# Altium footprint library 7343 footprint - pol cap.PcbLib: 1 footprints
Each footprint in its own frame and in the unit in brackets; x right, y up, seen from the top. Pads: shape width x height; smd on the part's side, far side on the other; paste and mask are expansions set on the pad; w line width, h text height; cw(c..) or ccw(c..) is an arc to the next point about the centre after c.
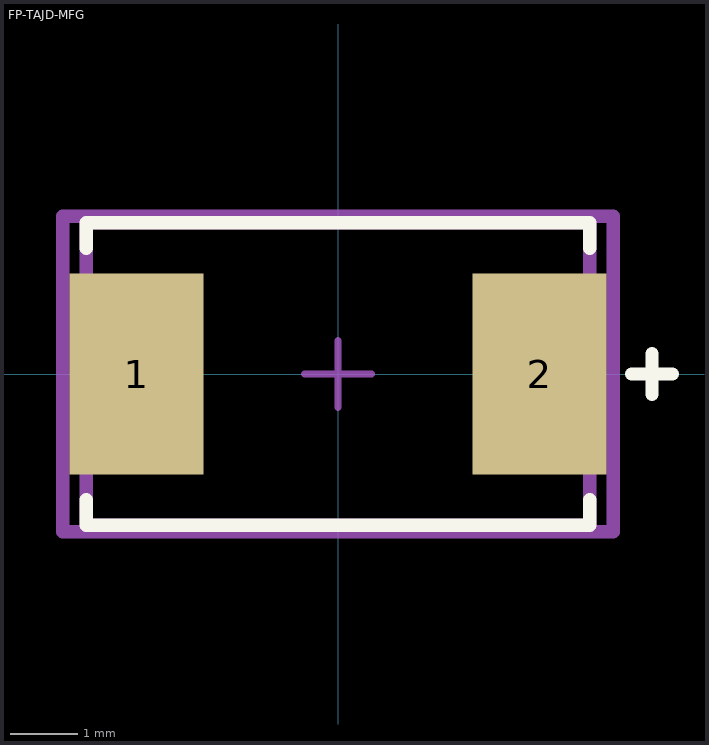
[diagram p0: the footprint, top view; thin cyan lines are the x and y axes]

## FP-TAJD-MFG [mm]
pads (2):
  rect 2x3 smd paste+0 mask+0: 1(-3,0) 2(3,0)
Top Overlay:
  lines w0.2: -3.75,-1.875 -3.75,-2.25 3.75,-2.25 3.75,-1.875 ; -3.75,1.875 -3.75,2.25 3.75,2.25 3.75,1.875 ; 4.375,0 4.975,0 ; 4.675,-0.3 4.675,0.3
Top Assembly:
  lines w0.2: -4.1,-2.35 -4.1,2.35 4.1,2.35 4.1,-2.35 -4.1,-2.35
  text ".Designator" at 0,-0.001 h1
Top 3D Body:
  lines w0.2: -3.75,-2.25 -3.75,2.25 3.75,2.25 3.75,-2.25 -3.75,-2.25
Top Courtyard:
  lines w0.2: -4.1,-2.35 -4.1,2.35 4.1,2.35 4.1,-2.35 -4.1,-2.35
Top Component Center:
  lines w0.1: -0.5,0 0.5,0 ; 0,-0.5 0,0.5
3D body "Cap_AVX_TAJD108K004RNJ_eec.STEP": height 0.25, standoff 0, extent -4.1,-2.35 4.1,2.35